# Altium footprint library ICs_VendorSpecific.PcbLib: 247 footprints (part 19 of 19)
Each footprint in its own frame and in the unit in brackets; x right, y up, seen from the top. Pads: shape width x height; smd on the part's side, far side on the other; paste and mask are expansions set on the pad; w line width, h text height; cw(c..) or ccw(c..) is an arc to the next point about the centre after c.
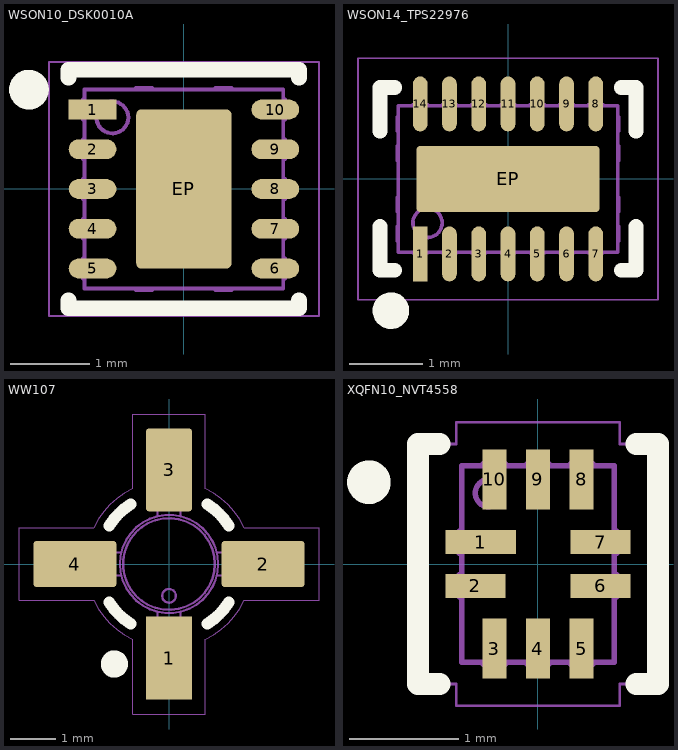
[diagram p18: the footprints below, top view; thin cyan lines are the x and y axes]

## WSON10_DSK0010A [mm] "WSON, 10-Leads, Body 2.50x2.50mm, Pitch 0.5mm, TI case DSK0010A"
height 0.75
pads (11):
  rect 0.6x0.25 smd paste-0.025 mask+0.05: 1(-1.15,1)
  oval 0.6x0.25 smd paste-0.025 mask+0.05: 2(-1.15,0.5) 3(-1.15,0) 4(-1.15,-0.5) 5(-1.15,-1) 6(1.15,-1) 7(1.15,-0.5) 8(1.15,0) 9(1.15,0.5) 10(1.15,1)
  rrect10% 1.2x2 smd paste-3 mask+0.05: EP(0,0)
Top Overlay:
  circle w0.25: c-1.95,1.25 r0.125
  lines w0.2: -1.45,-1.4 -1.45,-1.5 1.45,-1.5 1.45,-1.4 ; -1.45,1.4 -1.45,1.5 1.45,1.5 1.45,1.4
Top Paste:
  region: 0.55,0.95 -0.55,0.95 -0.55,0.15 0.55,0.15
  region: 0.55,-0.15 -0.55,-0.15 -0.55,-0.95 0.55,-0.95
Top Courtyard:
  lines w0.025: -1.7,-1.6 1.7,-1.6 1.7,1.6 -1.7,1.6 -1.7,-1.6
Top Assembly:
  circle w0.05: c-0.9,0.9 r0.2
  lines w0.05: -1.25,-1.125 -1.27,-1.125 -1.27,-0.875 -1.25,-0.875 ; -1.25,-0.625 -1.27,-0.625 -1.27,-0.375 -1.25,-0.375 ; -1.25,-0.125 -1.27,-0.125 -1.27,0.125 -1.25,0.125 ; -1.25,0.375 -1.27,0.375 -1.27,0.625 -1.25,0.625 ; -1.25,0.875 -1.27,0.875 -1.27,1.125 -1.25,1.125 ; -0.6,-1.25 -0.6,-1.27 -0.4,-1.27 -0.4,-1.25 ; -0.6,1.25 -0.6,1.27 -0.4,1.27 -0.4,1.25 ; 0.4,-1.25 0.4,-1.27 0.6,-1.27 0.6,-1.25 ; 0.4,1.25 0.4,1.27 0.6,1.27 0.6,1.25 ; 1.25,-1.125 1.27,-1.125 1.27,-0.875 1.25,-0.875 ; 1.25,-0.625 1.27,-0.625 1.27,-0.375 1.25,-0.375 ; 1.25,-0.125 1.27,-0.125 1.27,0.125 1.25,0.125 ; 1.25,0.375 1.27,0.375 1.27,0.625 1.25,0.625 ; 1.25,0.875 1.27,0.875 1.27,1.125 1.25,1.125 ; -1.25,-1.25 1.25,-1.25 1.25,1.25 -1.25,1.25 -1.25,-1.25
  text ".Designator" at -4.511,-0.453 h2
3D body "DSK0010A.x_t": height 0.77, standoff 0, extent -1.27,-1.27 1.27,1.27

## WSON14_TPS22976 [mm] "WSON, 14-Leads, Body 2.00x3.00mm, Exposed Pad 0.90 x 2.50 mm, Pitch 0.4mm. TI case style R-PWSON-N14"
height 0.75
pads (15):
  rect 0.2x0.75 smd paste+0 mask+0.05: 1(-1.2,-1.025)
  oval 0.2x0.75 smd paste+0 mask+0.05: 2(-0.8,-1.025) 3(-0.4,-1.025) 4(0,-1.025) 5(0.4,-1.025) 6(0.8,-1.025) 7(1.2,-1.025) 8(1.2,1.025) 9(0.8,1.025) 10(0.4,1.025) 11(0,1.025) 12(-0.4,1.025) 13(-0.8,1.025) 14(-1.2,1.025)
  rrect10% 2.5x0.9 smd paste-3 mask+0.05: EP(0,0)
Top Overlay:
  circle w0.25: c-1.6,-1.8 r0.125
  lines w0.2: -1.75,-0.65 -1.75,-1.25 -1.55,-1.25 ; -1.75,0.65 -1.75,1.25 -1.55,1.25 ; 1.55,-1.25 1.75,-1.25 1.75,-0.65 ; 1.55,1.25 1.75,1.25 1.75,0.65
Top Paste:
  region: 1.15,-0.375 1.15,0.375 0.15,0.375 0.15,-0.375
  region: -0.15,-0.375 -0.15,0.375 -1.15,0.375 -1.15,-0.375
Top Courtyard:
  lines w0.025: -2.05,-1.65 -2.05,1.65 2.05,1.65 2.05,-1.65 -2.05,-1.65
Top Assembly:
  circle w0.05: c-1.1,-0.6 r0.2
  lines w0.05: -1.5,-0.85 -1.51,-0.85 -1.51,-0.65 -1.5,-0.65 ; -1.5,-0.45 -1.51,-0.45 -1.51,-0.25 -1.5,-0.25 ; -1.5,0.25 -1.51,0.25 -1.51,0.45 -1.5,0.45 ; -1.5,0.65 -1.51,0.65 -1.51,0.85 -1.5,0.85 ; -1.3,-1 -1.3,-1.01 -1.1,-1.01 -1.1,-1 ; -1.3,1 -1.3,1.01 -1.1,1.01 -1.1,1 ; -0.9,-1 -0.9,-1.01 -0.7,-1.01 -0.7,-1 ; -0.9,1 -0.9,1.01 -0.7,1.01 -0.7,1 ; -0.5,-1 -0.5,-1.01 -0.3,-1.01 -0.3,-1 ; -0.5,1 -0.5,1.01 -0.3,1.01 -0.3,1 ; -0.1,-1 -0.1,-1.01 0.1,-1.01 0.1,-1 ; -0.1,1 -0.1,1.01 0.1,1.01 0.1,1 ; 0.3,-1 0.3,-1.01 0.5,-1.01 0.5,-1 ; 0.3,1 0.3,1.01 0.5,1.01 0.5,1 ; 0.7,-1 0.7,-1.01 0.9,-1.01 0.9,-1 ; 0.7,1 0.7,1.01 0.9,1.01 0.9,1 ; 1.1,-1 1.1,-1.01 1.3,-1.01 1.3,-1 ; 1.1,1 1.1,1.01 1.3,1.01 1.3,1 ; 1.5,-0.85 1.51,-0.85 1.51,-0.65 1.5,-0.65 ; 1.5,-0.45 1.51,-0.45 1.51,-0.25 1.5,-0.25 ; 1.5,0.25 1.51,0.25 1.51,0.45 1.5,0.45 ; 1.5,0.65 1.51,0.65 1.51,0.85 1.5,0.85 ; -1.5,-1 1.5,-1 1.5,1 -1.5,1 -1.5,-1
  text ".Designator" at -2.252,-0.226 h1
3D body "R-PWSON-N14.x_t": height 0.77, standoff 0, extent -1.51,-1.01 1.51,1.01

## WW107 [mm] "Minicircuits WW107 case style"
height 1.52
pads (4):
  rect 1.02x1.83 smd mask+0.05: 1(0,-2.07)
  rrect15% 1.83x1.02 smd mask+0.05: 2(2.07,0) 4(-2.07,0)
  rrect15% 1.02x1.83 smd mask+0.05: 3(0,2.07)
Top Overlay:
  circle w0.3: c-1.2,-2.2 r0.15
  lines w0.254: -1.317,-0.846 ccw(c0,0) -0.846,-1.317 ; -1.317,0.846 cw(c0,0) -0.846,1.317 ; 0.846,-1.317 ccw(c0,0) 1.317,-0.846 ; 0.846,1.317 cw(c0,0) 1.317,0.846
Top Courtyard:
  lines w0.025: -3.3,-0.8 -1.655,-0.8 ccw(c0,0) -0.8,-1.655 -0.8,-3.3 0.8,-3.3 0.8,-1.655 ccw(c0,0) 1.655,-0.8 3.3,-0.8 3.3,0.8 1.655,0.8 ccw(c0,0) 0.8,1.655 0.8,3.3 -0.8,3.3 -0.8,1.655 ccw(c0,0) -1.655,0.8 -3.3,0.8 -3.3,-0.8
Top Assembly:
  circle w0.05: c0,0 r1.009
  circle w0.05: c0,-0.7 r0.15
  lines w0.05: -2.001,-0.255 -2.001,0.255 ; -1.926,-0.255 -1.926,0.255 ; -1.765,-0.255 -1.765,0.255 ; -1.605,-0.255 -1.605,0.255 ; -1.049,-0.255 -2.34,-0.255 -2.34,0.255 -1.049,0.255 ; -0.255,-2.001 0.255,-2.001 ; -0.255,-1.926 0.255,-1.926 ; -0.255,-1.765 0.255,-1.765 ; -0.255,-1.605 0.255,-1.605 ; -0.255,1.605 0.255,1.605 ; -0.255,1.765 0.255,1.765 ; -0.255,1.926 0.255,1.926 ; -0.255,2.001 0.255,2.001 ; 0.255,-1.049 0.255,-2.54 -0.255,-2.34 -0.255,-1.049 ; 0.255,1.049 0.255,2.34 -0.255,2.34 -0.255,1.049 ; 1.049,-0.255 2.34,-0.255 2.34,0.255 1.049,0.255 ; 1.605,-0.255 1.605,0.255 ; 1.765,-0.255 1.765,0.255 ; 1.926,-0.255 1.926,0.255 ; 2.001,-0.255 2.001,0.255 ; -0.255,-1.049 cw(c0,0) -0.255,1.049 ; -0.255,-1.049 ccw(c0,0) -0.255,1.049
  text ".Designator" at -2.252,-0.226 h1
3D body "WW107_X_T.x_t": height 1.52, standoff -0.01, extent -2.34,-2.54 2.34,2.34

## XQFN10_NVT4558 [mm] "XQFN10 1.4mm x 1.8mm, 0.4mm pitch"
height 0.45
pads (10):
  rect 0.65x0.22 smd paste+0 mask+0.05: 1(-0.525,0.2)
  rect 0.55x0.22 smd paste+0 mask+0.05: 2(-0.575,-0.2) 6(0.575,-0.2) 7(0.575,0.2)
  rect 0.22x0.55 smd paste+0 mask+0.05: 3(-0.4,-0.775) 4(0,-0.775) 5(0.4,-0.775) 8(0.4,0.775) 9(0,0.775) 10(-0.4,0.775)
Top Overlay:
  circle w0.2: c-1.55,0.75 r0.1
  lines w0.2: -0.9,-1.1 -1.1,-1.1 -1.1,1.1 -0.9,1.1 ; 0.9,-1.1 1.1,-1.1 1.1,1.1 0.9,1.1
Top Courtyard:
  lines w0.025: -1.1,-1.1 -1.1,1.1 -0.75,1.1 -0.75,1.3 0.75,1.3 0.75,1.1 1.1,1.1 1.1,-1.1 0.75,-1.1 0.75,-1.3 -0.75,-1.3 -0.75,-1.1 -1.1,-1.1
Top Assembly:
  circle w0.05: c-0.45,0.65 r0.125
  lines w0.05: -0.7,-0.3 -0.72,-0.3 -0.72,-0.1 -0.7,-0.1 ; -0.7,0.1 -0.72,0.1 -0.72,0.3 -0.7,0.3 ; -0.5,-0.9 -0.5,-0.92 -0.3,-0.92 -0.3,-0.9 ; -0.5,0.9 -0.5,0.92 -0.3,0.92 -0.3,0.9 ; -0.1,-0.9 -0.1,-0.92 0.1,-0.92 0.1,-0.9 ; -0.1,0.9 -0.1,0.92 0.1,0.92 0.1,0.9 ; 0.3,-0.9 0.3,-0.92 0.5,-0.92 0.5,-0.9 ; 0.3,0.9 0.3,0.92 0.5,0.92 0.5,0.9 ; 0.7,-0.3 0.72,-0.3 0.72,-0.1 0.7,-0.1 ; 0.7,0.1 0.72,0.1 0.72,0.3 0.7,0.3 ; -0.7,-0.9 0.7,-0.9 0.7,0.9 -0.7,0.9 -0.7,-0.9
  text ".Designator" at 0.226,-2.252 h1
3D body "XQFN10.x_t": height 0.47, standoff 0, extent -0.72,-0.92 0.72,0.92